# Altium integrated library PASSIVE_COMPONENTS.IntLib: 3 symbols
Pins are listed as number, name and electrical type; pins without a type are passive.

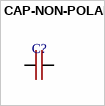
[diagram p0: symbol CAP-NON-POLAR]

## CAP-NON-POLAR
designator C?
footprint CAP-0402
footprint CAP-0201
footprint CAP-0603
footprint CAP-0805
footprint CAP-1206
footprint Hitano_100n_630V
footprint MKP 100nF 275VAC
pins: 1, 2


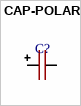
[diagram p1: symbol CAP-POLAR]

## CAP-POLAR
designator C?
footprint CAPPOL-18x40
footprint CAPPOL-30x35
footprint CAPPOL8x12
footprint CAPPOL-12x25
footprint CAPPOL-10x20
footprint Model Name (Footprint not found)
footprint CAP-TAN-A
footprint CAP-TAN-B
footprint CAP-TAN-B2
footprint CAP-TAN-C
footprint CAP-TAN-D
footprint CAP-TAN-R
footprint CAP-TAN-X
pins: 1 +, 2 -


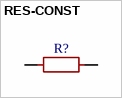
[diagram p2: symbol RES-CONST]

## RES-CONST
designator R?
footprint RES-0603
footprint RES-0201
footprint RES-1206
footprint RES-0402
footprint RES-0805
footprint RES-2512
footprint RES-3921
footprint RES-2W
pins: 1, 2